# Altium schematic symbol library WR-TBL_Pluggable Connector.SchLib: 879 symbols (part 14 of 15)
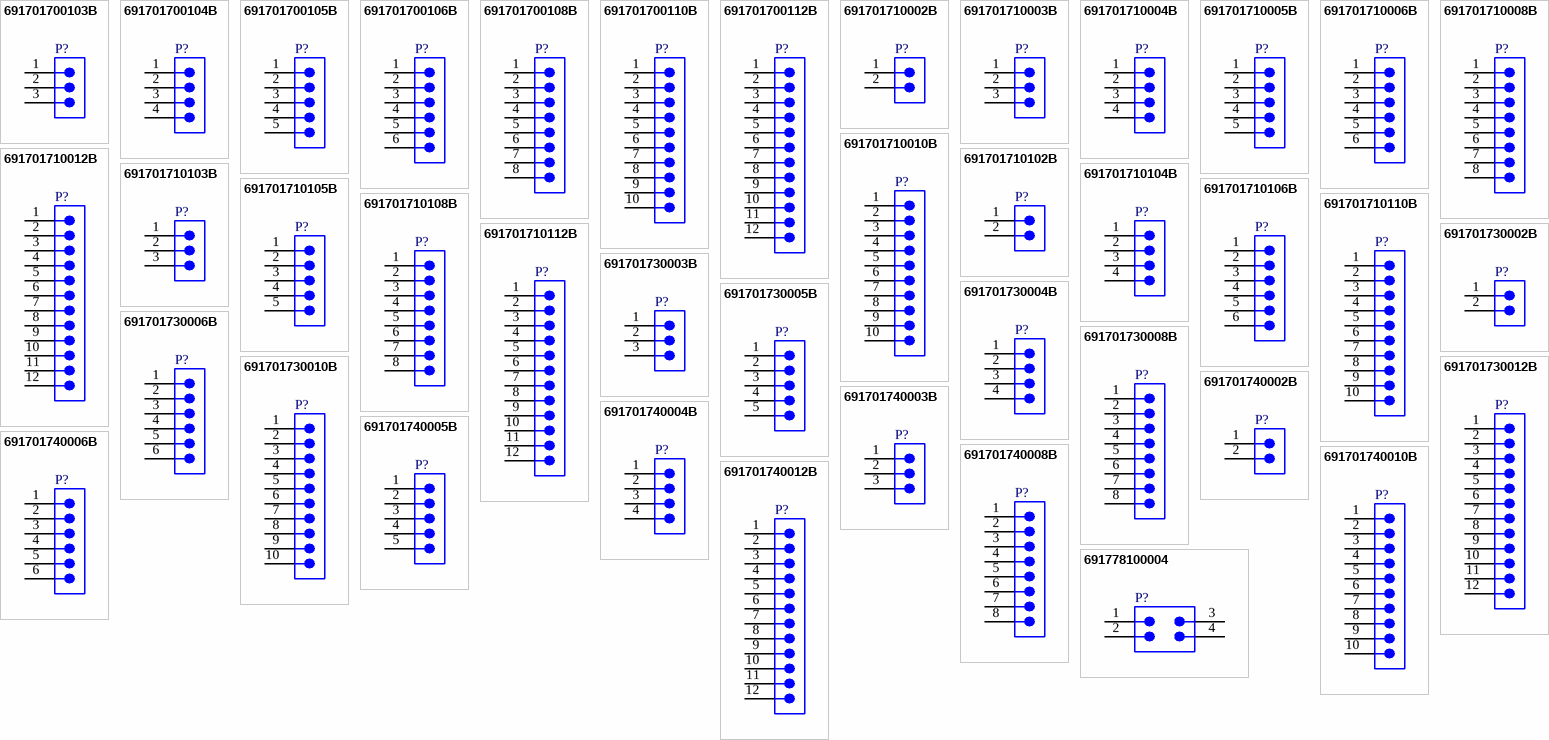
[diagram p34: symbols 691701700103B to 691778100004]

## 691701710005B
designator P?  (value not drawn)
WR-TBL Series 7017B Open Horizontal PCB Header, THR, pitch 5mm, 05p; Manufacturer: Wurth Elektronik; Insulator Material: LCP; Rated Current (cULus): 15A; Working Voltage (cULus): 300V (AC); Withstanding Voltage (cULus): 1600V (AC); Manufacturer Part Number: 691701710005B; Product Series: WR-TBL; ComponentLink1Description: Website Link; ComponentLink1URL: https://www.we-online.com; ComponentLink2Description: Datasheet Link; ComponentLink2URL: https://www.we-online.com/components/products/datasheet/691701710005B; Mount: Through Hole Reflow; Operating Temperature Min: -40degC; Operating Temperature Max: 130degC; Packaging: Tape and Reel; Application: Pluggable; Number of Pins: 5; Number of Rows: 1; Orientation: Horizontal; Lead Pitch: 5mm
footprint 691701710005B
pins: 1, 2, 3, 4, 5

## 691701710006B
designator P?  (value not drawn)
WR-TBL Series 7017B Open Horizontal PCB Header, THR, pitch 5mm, 06p; Manufacturer: Wurth Elektronik; Insulator Material: LCP; Rated Current (cULus): 15A; Working Voltage (cULus): 300V (AC); Withstanding Voltage (cULus): 1600V (AC); Manufacturer Part Number: 691701710006B; Product Series: WR-TBL; ComponentLink1Description: Website Link; ComponentLink1URL: https://www.we-online.com; ComponentLink2Description: Datasheet Link; ComponentLink2URL: https://www.we-online.com/components/products/datasheet/691701710006B; Mount: Through Hole Reflow; Operating Temperature Min: -40degC; Operating Temperature Max: 130degC; Packaging: Tape and Reel; Application: Pluggable; Number of Pins: 6; Number of Rows: 1; Orientation: Horizontal; Lead Pitch: 5mm
footprint 691701710006B
pins: 1, 2, 3, 4, 5, 6

## 691701710008B
designator P?  (value not drawn)
WR-TBL Series 7017B Open Horizontal PCB Header, THR, pitch 5mm, 08p; Manufacturer: Wurth Elektronik; Insulator Material: LCP; Rated Current (cULus): 15A; Working Voltage (cULus): 300V (AC); Withstanding Voltage (cULus): 1600V (AC); Manufacturer Part Number: 691701710008B; Product Series: WR-TBL; ComponentLink1Description: Website Link; ComponentLink1URL: https://www.we-online.com; ComponentLink2Description: Datasheet Link; ComponentLink2URL: https://www.we-online.com/components/products/datasheet/691701710008B; Mount: Through Hole Reflow; Operating Temperature Min: -40degC; Operating Temperature Max: 130degC; Packaging: Tape and Reel; Application: Pluggable; Number of Pins: 8; Number of Rows: 1; Orientation: Horizontal; Lead Pitch: 5mm
footprint 691701710008B
pins: 1, 2, 3, 4, 5, 6, 7, 8

## 691701710010B
designator P?  (value not drawn)
WR-TBL Series 7017B Open Horizontal PCB Header, THR, pitch 5mm, 10p; Manufacturer: Wurth Elektronik; Insulator Material: LCP; Rated Current (cULus): 15A; Working Voltage (cULus): 300V (AC); Withstanding Voltage (cULus): 1600V (AC); Manufacturer Part Number: 691701710010B; Product Series: WR-TBL; ComponentLink1Description: Website Link; ComponentLink1URL: https://www.we-online.com; ComponentLink2Description: Datasheet Link; ComponentLink2URL: https://www.we-online.com/components/products/datasheet/691701710010B; Mount: Through Hole Reflow; Operating Temperature Min: -40degC; Operating Temperature Max: 130degC; Packaging: Tape and Reel; Application: Pluggable; Number of Pins: 10; Number of Rows: 1; Orientation: Horizontal; Lead Pitch: 5mm
footprint 691701710010B
pins: 1, 2, 3, 4, 5, 6, 7, 8, 9, 10

## 691701710012B
designator P?  (value not drawn)
WR-TBL Series 7017B Open Horizontal PCB Header, THR, pitch 5mm, 12p; Manufacturer: Wurth Elektronik; Insulator Material: LCP; Rated Current (cULus): 15A; Working Voltage (cULus): 300V (AC); Withstanding Voltage (cULus): 1600V (AC); Manufacturer Part Number: 691701710012B; Product Series: WR-TBL; ComponentLink1Description: Website Link; ComponentLink1URL: https://www.we-online.com; ComponentLink2Description: Datasheet Link; ComponentLink2URL: https://www.we-online.com/components/products/datasheet/691701710012B; Mount: Through Hole Reflow; Operating Temperature Min: -40degC; Operating Temperature Max: 130degC; Packaging: Tape and Reel; Application: Pluggable; Number of Pins: 12; Number of Rows: 1; Orientation: Horizontal; Lead Pitch: 5mm
footprint 691701710012B
pins: 1, 2, 3, 4, 5, 6, 7, 8, 9, 10, 11, 12

## 691701710102B
designator P?  (value not drawn)
WR-TBL Series 7017B Closed Horizontal PCB Header, THR, pitch 5mm, 02p; Manufacturer: Wurth Elektronik; Insulator Material: LCP; Rated Current (cULus): 15A; Working Voltage (cULus): 300V (AC); Withstanding Voltage (cULus): 1600V (AC); Manufacturer Part Number: 691701710102B; Product Series: WR-TBL; ComponentLink1Description: Website Link; ComponentLink1URL: https://www.we-online.com; ComponentLink2Description: Datasheet Link; ComponentLink2URL: https://www.we-online.com/components/products/datasheet/691701710102B; Mount: Through Hole Reflow; Operating Temperature Min: -40degC; Operating Temperature Max: 130degC; Packaging: Tape and Reel; Application: Pluggable; Number of Pins: 2; Number of Rows: 1; Orientation: Horizontal; Lead Pitch: 5mm
footprint 691701710102B
pins: 1, 2

## 691701710103B
designator P?  (value not drawn)
WR-TBL Series 7017B Closed Horizontal PCB Header, THR, pitch 5mm, 03p; Manufacturer: Wurth Elektronik; Insulator Material: LCP; Rated Current (cULus): 15A; Working Voltage (cULus): 300V (AC); Withstanding Voltage (cULus): 1600V (AC); Manufacturer Part Number: 691701710103B; Product Series: WR-TBL; ComponentLink1Description: Website Link; ComponentLink1URL: https://www.we-online.com; ComponentLink2Description: Datasheet Link; ComponentLink2URL: https://www.we-online.com/components/products/datasheet/691701710103B; Mount: Through Hole Reflow; Operating Temperature Min: -40degC; Operating Temperature Max: 130degC; Packaging: Tape and Reel; Application: Pluggable; Number of Pins: 3; Number of Rows: 1; Orientation: Horizontal; Lead Pitch: 5mm
footprint 691701710103B
pins: 1, 2, 3

## 691701710104B
designator P?  (value not drawn)
WR-TBL Series 7017B Closed Horizontal PCB Header, THR, pitch 5mm, 04p; Manufacturer: Wurth Elektronik; Insulator Material: LCP; Rated Current (cULus): 15A; Working Voltage (cULus): 300V (AC); Withstanding Voltage (cULus): 1600V (AC); Manufacturer Part Number: 691701710104B; Product Series: WR-TBL; ComponentLink1Description: Website Link; ComponentLink1URL: https://www.we-online.com; ComponentLink2Description: Datasheet Link; ComponentLink2URL: https://www.we-online.com/components/products/datasheet/691701710104B; Mount: Through Hole Reflow; Operating Temperature Min: -40degC; Operating Temperature Max: 130degC; Packaging: Tape and Reel; Application: Pluggable; Number of Pins: 4; Number of Rows: 1; Orientation: Horizontal; Lead Pitch: 5mm
footprint 691701710104B
pins: 1, 2, 3, 4

## 691701710105B
designator P?  (value not drawn)
WR-TBL Series 7017B Closed Horizontal PCB Header, THR, pitch 5mm, 05p; Manufacturer: Wurth Elektronik; Insulator Material: LCP; Rated Current (cULus): 15A; Working Voltage (cULus): 300V (AC); Withstanding Voltage (cULus): 1600V (AC); Manufacturer Part Number: 691701710105B; Product Series: WR-TBL; ComponentLink1Description: Website Link; ComponentLink1URL: https://www.we-online.com; ComponentLink2Description: Datasheet Link; ComponentLink2URL: https://www.we-online.com/components/products/datasheet/691701710105B; Mount: Through Hole Reflow; Operating Temperature Min: -40degC; Operating Temperature Max: 130degC; Packaging: Tape and Reel; Application: Pluggable; Number of Pins: 5; Number of Rows: 1; Orientation: Horizontal; Lead Pitch: 5mm
footprint 691701710105B
pins: 1, 2, 3, 4, 5

## 691701710106B
designator P?  (value not drawn)
WR-TBL Series 7017B Closed Horizontal PCB Header, THR, pitch 5mm, 06p; Manufacturer: Wurth Elektronik; Insulator Material: LCP; Rated Current (cULus): 15A; Working Voltage (cULus): 300V (AC); Withstanding Voltage (cULus): 1600V (AC); Manufacturer Part Number: 691701710106B; Product Series: WR-TBL; ComponentLink1Description: Website Link; ComponentLink1URL: https://www.we-online.com; ComponentLink2Description: Datasheet Link; ComponentLink2URL: https://www.we-online.com/components/products/datasheet/691701710106B; Mount: Through Hole Reflow; Operating Temperature Min: -40degC; Operating Temperature Max: 130degC; Packaging: Tape and Reel; Application: Pluggable; Number of Pins: 6; Number of Rows: 1; Orientation: Horizontal; Lead Pitch: 5mm
footprint 691701710106B
pins: 1, 2, 3, 4, 5, 6

## 691701710108B
designator P?  (value not drawn)
WR-TBL Series 7017B Closed Horizontal PCB Header, THR, pitch 5mm, 08p; Manufacturer: Wurth Elektronik; Insulator Material: LCP; Rated Current (cULus): 15A; Working Voltage (cULus): 300V (AC); Withstanding Voltage (cULus): 1600V (AC); Manufacturer Part Number: 691701710108B; Product Series: WR-TBL; ComponentLink1Description: Website Link; ComponentLink1URL: https://www.we-online.com; ComponentLink2Description: Datasheet Link; ComponentLink2URL: https://www.we-online.com/components/products/datasheet/691701710108B; Mount: Through Hole Reflow; Operating Temperature Min: -40degC; Operating Temperature Max: 130degC; Packaging: Tape and Reel; Application: Pluggable; Number of Pins: 8; Number of Rows: 1; Orientation: Horizontal; Lead Pitch: 5mm
footprint 691701710108B
pins: 1, 2, 3, 4, 5, 6, 7, 8

## 691701710110B
designator P?  (value not drawn)
WR-TBL Series 7017B Closed Horizontal PCB Header, THR, pitch 5mm, 10p; Manufacturer: Wurth Elektronik; Insulator Material: LCP; Rated Current (cULus): 15A; Working Voltage (cULus): 300V (AC); Withstanding Voltage (cULus): 1600V (AC); Manufacturer Part Number: 691701710110B; Product Series: WR-TBL; ComponentLink1Description: Website Link; ComponentLink1URL: https://www.we-online.com; ComponentLink2Description: Datasheet Link; ComponentLink2URL: https://www.we-online.com/components/products/datasheet/691701710110B; Mount: Through Hole Reflow; Operating Temperature Min: -40degC; Operating Temperature Max: 130degC; Packaging: Tape and Reel; Application: Pluggable; Number of Pins: 10; Number of Rows: 1; Orientation: Horizontal; Lead Pitch: 5mm
footprint 691701710110B
pins: 1, 2, 3, 4, 5, 6, 7, 8, 9, 10

## 691701710112B
designator P?  (value not drawn)
WR-TBL Series 7017B Closed Horizontal PCB Header, THR, pitch 5mm, 12p; Manufacturer: Wurth Elektronik; Insulator Material: LCP; Rated Current (cULus): 15A; Working Voltage (cULus): 300V (AC); Withstanding Voltage (cULus): 1600V (AC); Manufacturer Part Number: 691701710112B; Product Series: WR-TBL; ComponentLink1Description: Website Link; ComponentLink1URL: https://www.we-online.com; ComponentLink2Description: Datasheet Link; ComponentLink2URL: https://www.we-online.com/components/products/datasheet/691701710112B; Mount: Through Hole Reflow; Operating Temperature Min: -40degC; Operating Temperature Max: 130degC; Packaging: Tape and Reel; Application: Pluggable; Number of Pins: 12; Number of Rows: 1; Orientation: Horizontal; Lead Pitch: 5mm
footprint 691701710112B
pins: 1, 2, 3, 4, 5, 6, 7, 8, 9, 10, 11, 12

## 691701730002B
designator P?  (value not drawn)
WR-TBL Series 7017B Closed Vertical PCB Header with Flanges, THR, pitch 5mm, 02p; Manufacturer: Wurth Elektronik; Insulator Material: LCP; Rated Current (cULus): 15A; Working Voltage (cULus): 300V (AC); Withstanding Voltage (cULus): 1600V (AC); Manufacturer Part Number: 691701730002B; Product Series: WR-TBL; ComponentLink1Description: Website Link; ComponentLink1URL: https://www.we-online.com; ComponentLink2Description: Datasheet Link; ComponentLink2URL: https://www.we-online.com/components/products/datasheet/691701730002B; Mount: Through Hole Reflow; Operating Temperature Min: -40degC; Operating Temperature Max: 130degC; Packaging: Tape and Reel; Application: Pluggable; Number of Pins: 2; Number of Rows: 1; Orientation: Vertical; Lead Pitch: 5mm
footprint 691701730002B
pins: 1, 2

## 691701730003B
designator P?  (value not drawn)
WR-TBL Series 7017B Closed Vertical PCB Header with Flanges, THR, pitch 5mm, 03p; Manufacturer: Wurth Elektronik; Insulator Material: LCP; Rated Current (cULus): 15A; Working Voltage (cULus): 300V (AC); Withstanding Voltage (cULus): 1600V (AC); Manufacturer Part Number: 691701730003B; Product Series: WR-TBL; ComponentLink1Description: Website Link; ComponentLink1URL: https://www.we-online.com; ComponentLink2Description: Datasheet Link; ComponentLink2URL: https://www.we-online.com/components/products/datasheet/691701730003B; Mount: Through Hole Reflow; Operating Temperature Min: -40degC; Operating Temperature Max: 130degC; Packaging: Tape and Reel; Application: Pluggable; Number of Pins: 3; Number of Rows: 1; Orientation: Vertical; Lead Pitch: 5mm
footprint 691701730003B
pins: 1, 2, 3

## 691701730004B
designator P?  (value not drawn)
WR-TBL Series 7017B Closed Vertical PCB Header with Flanges, THR, pitch 5mm, 04p; Manufacturer: Wurth Elektronik; Insulator Material: LCP; Rated Current (cULus): 15A; Working Voltage (cULus): 300V (AC); Withstanding Voltage (cULus): 1600V (AC); Manufacturer Part Number: 691701730004B; Product Series: WR-TBL; ComponentLink1Description: Website Link; ComponentLink1URL: https://www.we-online.com; ComponentLink2Description: Datasheet Link; ComponentLink2URL: https://www.we-online.com/components/products/datasheet/691701730004B; Mount: Through Hole Reflow; Operating Temperature Min: -40degC; Operating Temperature Max: 130degC; Packaging: Tape and Reel; Application: Pluggable; Number of Pins: 4; Number of Rows: 1; Orientation: Vertical; Lead Pitch: 5mm
footprint 691701730004B
pins: 1, 2, 3, 4

## 691701730005B
designator P?  (value not drawn)
WR-TBL Series 7017B Closed Vertical PCB Header with Flanges, THR, pitch 5mm, 05p; Manufacturer: Wurth Elektronik; Insulator Material: LCP; Rated Current (cULus): 15A; Working Voltage (cULus): 300V (AC); Withstanding Voltage (cULus): 1600V (AC); Manufacturer Part Number: 691701730005B; Product Series: WR-TBL; ComponentLink1Description: Website Link; ComponentLink1URL: https://www.we-online.com; ComponentLink2Description: Datasheet Link; ComponentLink2URL: https://www.we-online.com/components/products/datasheet/691701730005B; Mount: Through Hole Reflow; Operating Temperature Min: -40degC; Operating Temperature Max: 130degC; Packaging: Tape and Reel; Application: Pluggable; Number of Pins: 5; Number of Rows: 1; Orientation: Vertical; Lead Pitch: 5mm
footprint 691701730005B
pins: 1, 2, 3, 4, 5

## 691701730006B
designator P?  (value not drawn)
WR-TBL Series 7017B Closed Vertical PCB Header with Flanges, THR, pitch 5mm, 06p; Manufacturer: Wurth Elektronik; Insulator Material: LCP; Rated Current (cULus): 15A; Working Voltage (cULus): 300V (AC); Withstanding Voltage (cULus): 1600V (AC); Manufacturer Part Number: 691701730006B; Product Series: WR-TBL; ComponentLink1Description: Website Link; ComponentLink1URL: https://www.we-online.com; ComponentLink2Description: Datasheet Link; ComponentLink2URL: https://www.we-online.com/components/products/datasheet/691701730006B; Mount: Through Hole Reflow; Operating Temperature Min: -40degC; Operating Temperature Max: 130degC; Packaging: Tape and Reel; Application: Pluggable; Number of Pins: 6; Number of Rows: 1; Orientation: Vertical; Lead Pitch: 5mm
footprint 691701730006B
pins: 1, 2, 3, 4, 5, 6

## 691701730008B
designator P?  (value not drawn)
WR-TBL Series 7017B Closed Vertical PCB Header with Flanges, THR, pitch 5mm, 08p; Manufacturer: Wurth Elektronik; Insulator Material: LCP; Rated Current (cULus): 15A; Working Voltage (cULus): 300V (AC); Withstanding Voltage (cULus): 1600V (AC); Manufacturer Part Number: 691701730008B; Product Series: WR-TBL; ComponentLink1Description: Website Link; ComponentLink1URL: https://www.we-online.com; ComponentLink2Description: Datasheet Link; ComponentLink2URL: https://www.we-online.com/components/products/datasheet/691701730008B; Mount: Through Hole Reflow; Operating Temperature Min: -40degC; Operating Temperature Max: 130degC; Packaging: Tape and Reel; Application: Pluggable; Number of Pins: 8; Number of Rows: 1; Orientation: Vertical; Lead Pitch: 5mm
footprint 691701730008B
pins: 1, 2, 3, 4, 5, 6, 7, 8

## 691701730010B
designator P?  (value not drawn)
WR-TBL Series 7017B Closed Vertical PCB Header with Flanges, THR, pitch 5mm, 10p; Manufacturer: Wurth Elektronik; Insulator Material: LCP; Rated Current (cULus): 15A; Working Voltage (cULus): 300V (AC); Withstanding Voltage (cULus): 1600V (AC); Manufacturer Part Number: 691701730010B; Product Series: WR-TBL; ComponentLink1Description: Website Link; ComponentLink1URL: https://www.we-online.com; ComponentLink2Description: Datasheet Link; ComponentLink2URL: https://www.we-online.com/components/products/datasheet/691701730010B; Mount: Through Hole Reflow; Operating Temperature Min: -40degC; Operating Temperature Max: 130degC; Packaging: Tape and Reel; Application: Pluggable; Number of Pins: 10; Number of Rows: 1; Orientation: Vertical; Lead Pitch: 5mm
footprint 691701730010B
pins: 1, 2, 3, 4, 5, 6, 7, 8, 9, 10

## 691701730012B
designator P?  (value not drawn)
WR-TBL Series 7017B Closed Vertical PCB Header with Flanges, THR, pitch 5mm, 12p; Manufacturer: Wurth Elektronik; Insulator Material: LCP; Rated Current (cULus): 15A; Working Voltage (cULus): 300V (AC); Withstanding Voltage (cULus): 1600V (AC); Manufacturer Part Number: 691701730012B; Product Series: WR-TBL; ComponentLink1Description: Website Link; ComponentLink1URL: https://www.we-online.com; ComponentLink2Description: Datasheet Link; ComponentLink2URL: https://www.we-online.com/components/products/datasheet/691701730012B; Mount: Through Hole Reflow; Operating Temperature Min: -40degC; Operating Temperature Max: 130degC; Packaging: Tape and Reel; Application: Pluggable; Number of Pins: 12; Number of Rows: 1; Orientation: Vertical; Lead Pitch: 5mm
footprint 691701730012B
pins: 1, 2, 3, 4, 5, 6, 7, 8, 9, 10, 11, 12

## 691701740002B
designator P?  (value not drawn)
WR-TBL Series 7017B Closed Horizontal PCB Header with Flanges, THR, pitch 5mm, 02p; Manufacturer: Wurth Elektronik; Insulator Material: LCP; Rated Current (cULus): 15A; Working Voltage (cULus): 300V (AC); Withstanding Voltage (cULus): 1600V (AC); Manufacturer Part Number: 691701740002B; Product Series: WR-TBL; ComponentLink1Description: Website Link; ComponentLink1URL: https://www.we-online.com; ComponentLink2Description: Datasheet Link; ComponentLink2URL: https://www.we-online.com/components/products/datasheet/691701740002B; Mount: Through Hole Reflow; Operating Temperature Min: -40degC; Operating Temperature Max: 130degC; Packaging: Tape and Reel; Application: Pluggable; Number of Pins: 2; Number of Rows: 1; Orientation: Horizontal; Lead Pitch: 5mm
footprint 691701740002B
pins: 1, 2

## 691701740003B
designator P?  (value not drawn)
WR-TBL Series 7017B Closed Horizontal PCB Header with Flanges, THR, pitch 5mm, 03p; Manufacturer: Wurth Elektronik; Insulator Material: LCP; Rated Current (cULus): 15A; Working Voltage (cULus): 300V (AC); Withstanding Voltage (cULus): 1600V (AC); Manufacturer Part Number: 691701740003B; Product Series: WR-TBL; ComponentLink1Description: Website Link; ComponentLink1URL: https://www.we-online.com; ComponentLink2Description: Datasheet Link; ComponentLink2URL: https://www.we-online.com/components/products/datasheet/691701740003B; Mount: Through Hole Reflow; Operating Temperature Min: -40degC; Operating Temperature Max: 130degC; Packaging: Tape and Reel; Application: Pluggable; Number of Pins: 3; Number of Rows: 1; Orientation: Horizontal; Lead Pitch: 5mm
footprint 691701740003B
pins: 1, 2, 3

## 691701740004B
designator P?  (value not drawn)
WR-TBL Series 7017B Closed Horizontal PCB Header with Flanges, THR, pitch 5mm, 04p; Manufacturer: Wurth Elektronik; Insulator Material: LCP; Rated Current (cULus): 15A; Working Voltage (cULus): 300V (AC); Withstanding Voltage (cULus): 1600V (AC); Manufacturer Part Number: 691701740004B; Product Series: WR-TBL; ComponentLink1Description: Website Link; ComponentLink1URL: https://www.we-online.com; ComponentLink2Description: Datasheet Link; ComponentLink2URL: https://www.we-online.com/components/products/datasheet/691701740004B; Mount: Through Hole Reflow; Operating Temperature Min: -40degC; Operating Temperature Max: 130degC; Packaging: Tape and Reel; Application: Pluggable; Number of Pins: 4; Number of Rows: 1; Orientation: Horizontal; Lead Pitch: 5mm
footprint 691701740004B
pins: 1, 2, 3, 4

## 691701740005B
designator P?  (value not drawn)
WR-TBL Series 7017B Closed Horizontal PCB Header with Flanges, THR, pitch 5mm, 05p; Manufacturer: Wurth Elektronik; Insulator Material: LCP; Rated Current (cULus): 15A; Working Voltage (cULus): 300V (AC); Withstanding Voltage (cULus): 1600V (AC); Manufacturer Part Number: 691701740005B; Product Series: WR-TBL; ComponentLink1Description: Website Link; ComponentLink1URL: https://www.we-online.com; ComponentLink2Description: Datasheet Link; ComponentLink2URL: https://www.we-online.com/components/products/datasheet/691701740005B; Mount: Through Hole Reflow; Operating Temperature Min: -40degC; Operating Temperature Max: 130degC; Packaging: Tape and Reel; Application: Pluggable; Number of Pins: 5; Number of Rows: 1; Orientation: Horizontal; Lead Pitch: 5mm
footprint 691701740005B
pins: 1, 2, 3, 4, 5

## 691701740006B
designator P?  (value not drawn)
WR-TBL Series 7017B Closed Horizontal PCB Header with Flanges, THR, pitch 5mm, 06p; Manufacturer: Wurth Elektronik; Insulator Material: LCP; Rated Current (cULus): 15A; Working Voltage (cULus): 300V (AC); Withstanding Voltage (cULus): 1600V (AC); Manufacturer Part Number: 691701740006B; Product Series: WR-TBL; ComponentLink1Description: Website Link; ComponentLink1URL: https://www.we-online.com; ComponentLink2Description: Datasheet Link; ComponentLink2URL: https://www.we-online.com/components/products/datasheet/691701740006B; Mount: Through Hole Reflow; Operating Temperature Min: -40degC; Operating Temperature Max: 130degC; Packaging: Tape and Reel; Application: Pluggable; Number of Pins: 6; Number of Rows: 1; Orientation: Horizontal; Lead Pitch: 5mm
footprint 691701740006B
pins: 1, 2, 3, 4, 5, 6

## 691701740008B
designator P?  (value not drawn)
WR-TBL Series 7017B Closed Horizontal PCB Header with Flanges, THR, pitch 5mm, 08p; Manufacturer: Wurth Elektronik; Insulator Material: LCP; Rated Current (cULus): 15A; Working Voltage (cULus): 300V (AC); Withstanding Voltage (cULus): 1600V (AC); Manufacturer Part Number: 691701740008B; Product Series: WR-TBL; ComponentLink1Description: Website Link; ComponentLink1URL: https://www.we-online.com; ComponentLink2Description: Datasheet Link; ComponentLink2URL: https://www.we-online.com/components/products/datasheet/691701740008B; Mount: Through Hole Reflow; Operating Temperature Min: -40degC; Operating Temperature Max: 130degC; Packaging: Tape and Reel; Application: Pluggable; Number of Pins: 8; Number of Rows: 1; Orientation: Horizontal; Lead Pitch: 5mm
footprint 691701740008B
pins: 1, 2, 3, 4, 5, 6, 7, 8

## 691701740010B
designator P?  (value not drawn)
WR-TBL Series 7017B Closed Horizontal PCB Header with Flanges, THR, pitch 5mm, 10p; Manufacturer: Wurth Elektronik; Insulator Material: LCP; Rated Current (cULus): 15A; Working Voltage (cULus): 300V (AC); Withstanding Voltage (cULus): 2000V (AC); Manufacturer Part Number: 691701740010B; Product Series: WR-TBL; ComponentLink1Description: Website Link; ComponentLink1URL: https://www.we-online.com; ComponentLink2Description: Datasheet Link; ComponentLink2URL: https://www.we-online.com/components/products/datasheet/691701740010B; Mount: Through Hole Reflow; Operating Temperature Min: -40degC; Operating Temperature Max: 130degC; Packaging: Tape and Reel; Application: Pluggable; Number of Pins: 10; Number of Rows: 1; Orientation: Horizontal; Lead Pitch: 5mm
footprint 691701740010B
pins: 1, 2, 3, 4, 5, 6, 7, 8, 9, 10

## 691701740012B
designator P?  (value not drawn)
WR-TBL Series 7017B Closed Horizontal PCB Header with Flanges, THR, pitch 5mm, 12p; Manufacturer: Wurth Elektronik; Insulator Material: LCP; Rated Current (cULus): 15A; Working Voltage (cULus): 300V (AC); Withstanding Voltage (cULus): 2000V (AC); Manufacturer Part Number: 691701740012B; Product Series: WR-TBL; ComponentLink1Description: Website Link; ComponentLink1URL: https://www.we-online.com; ComponentLink2Description: Datasheet Link; ComponentLink2URL: https://www.we-online.com/components/products/datasheet/691701740012B; Mount: Through Hole Reflow; Operating Temperature Min: -40degC; Operating Temperature Max: 130degC; Packaging: Tape and Reel; Application: Pluggable; Number of Pins: 12; Number of Rows: 1; Orientation: Horizontal; Lead Pitch: 5mm
footprint 691701740012B
pins: 1, 2, 3, 4, 5, 6, 7, 8, 9, 10, 11, 12

## 691778100004
designator P?  (value not drawn)
WR-TBL Series 7781 PCB Header Dual Row Vertical, THR, pitch 3.5mm, 04p; Manufacturer: Wurth Elektronik; Insulator Material: LCP; Rated Current: 8A; Working Voltage: 300V (AC); Withstanding Voltage: 1600V (AC); Manufacturer Part Number: 691778100004; Product Series: WR-TBL; ComponentLink1Description: Website Link; ComponentLink1URL: https://www.we-online.com; ComponentLink2Description: Datasheet Link; ComponentLink2URL: https://www.we-online.com/components/products/datasheet/691778100004; Mount: Through Hole Reflow; Operating Temperature Min: -40degC; Operating Temperature Max: 130degC; Packaging: Tape and Reel; Application: Pluggable; Number of Pins: 4; Number of Rows: 2; Orientation: Vertical; Lead Pitch: 3.5mm
footprint 691778100004
pins: 1, 2, 3, 4

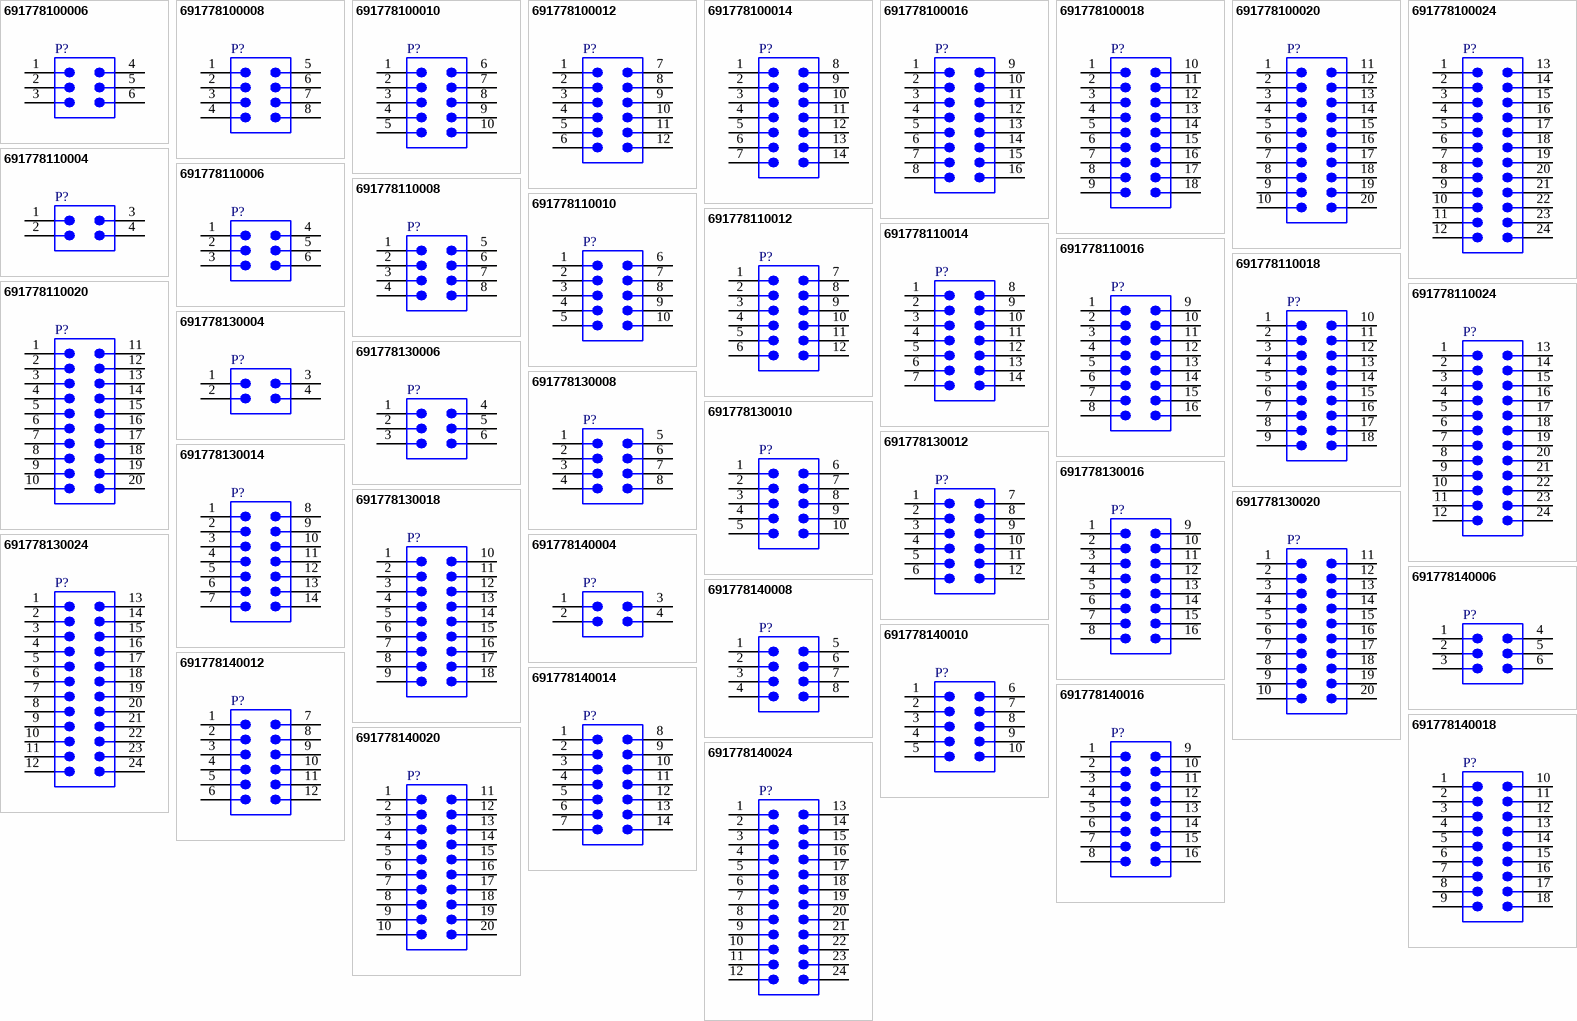
[diagram p21: symbols 691778100006 to 691778140024]

## 691778100006
designator P?  (value not drawn)
WR-TBL Series 7781 PCB Header Dual Row Vertical, THR, pitch 3.5mm, 06p; Manufacturer: Wurth Elektronik; Insulator Material: LCP; Rated Current: 8A; Working Voltage: 300V (AC); Withstanding Voltage: 1600V (AC); Manufacturer Part Number: 691778100006; Product Series: WR-TBL; ComponentLink1Description: Website Link; ComponentLink1URL: https://www.we-online.com; ComponentLink2Description: Datasheet Link; ComponentLink2URL: https://www.we-online.com/components/products/datasheet/691778100006; Mount: Through Hole Reflow; Operating Temperature Min: -40degC; Operating Temperature Max: 130degC; Packaging: Tape and Reel; Application: Pluggable; Number of Pins: 6; Number of Rows: 2; Orientation: Vertical; Lead Pitch: 3.5mm
footprint 691778100006
pins: 1, 2, 3, 4, 5, 6

## 691778100008
designator P?  (value not drawn)
WR-TBL Series 7781 PCB Header Dual Row Vertical, THR, pitch 3.5mm, 08p; Manufacturer: Wurth Elektronik; Insulator Material: LCP; Rated Current: 8A; Working Voltage: 300V (AC); Withstanding Voltage: 1600V (AC); Manufacturer Part Number: 691778100008; Product Series: WR-TBL; ComponentLink1Description: Website Link; ComponentLink1URL: https://www.we-online.com; ComponentLink2Description: Datasheet Link; ComponentLink2URL: https://www.we-online.com/components/products/datasheet/691778100008; Mount: Through Hole Reflow; Operating Temperature Min: -40degC; Operating Temperature Max: 130degC; Packaging: Tape and Reel; Application: Pluggable; Number of Pins: 8; Number of Rows: 2; Orientation: Vertical; Lead Pitch: 3.5mm
footprint 691778100008
pins: 1, 2, 3, 4, 5, 6, 7, 8

## 691778100010
designator P?  (value not drawn)
WR-TBL Series 7781 PCB Header Dual Row Vertical, THR, pitch 3.5mm, 10p; Manufacturer: Wurth Elektronik; Insulator Material: LCP; Rated Current: 8A; Working Voltage: 300V (AC); Withstanding Voltage: 1600V (AC); Manufacturer Part Number: 691778100010; Product Series: WR-TBL; ComponentLink1Description: Website Link; ComponentLink1URL: https://www.we-online.com; ComponentLink2Description: Datasheet Link; ComponentLink2URL: https://www.we-online.com/components/products/datasheet/691778100010; Mount: Through Hole Reflow; Operating Temperature Min: -40degC; Operating Temperature Max: 130degC; Packaging: Tape and Reel; Application: Pluggable; Number of Pins: 10; Number of Rows: 2; Orientation: Vertical; Lead Pitch: 3.5mm
footprint 691778100010
pins: 1, 2, 3, 4, 5, 6, 7, 8, 9, 10

## 691778100012
designator P?  (value not drawn)
WR-TBL Series 7781 PCB Header Dual Row Vertical, THR, pitch 3.5mm, 12p; Manufacturer: Wurth Elektronik; Insulator Material: LCP; Rated Current: 8A; Working Voltage: 300V (AC); Withstanding Voltage: 1600V (AC); Manufacturer Part Number: 691778100012; Product Series: WR-TBL; ComponentLink1Description: Website Link; ComponentLink1URL: https://www.we-online.com; ComponentLink2Description: Datasheet Link; ComponentLink2URL: https://www.we-online.com/components/products/datasheet/691778100012; Mount: Through Hole Reflow; Operating Temperature Min: -40degC; Operating Temperature Max: 130degC; Packaging: Tape and Reel; Application: Pluggable; Number of Pins: 12; Number of Rows: 2; Orientation: Vertical; Lead Pitch: 3.5mm
footprint 691778100012
pins: 1, 2, 3, 4, 5, 6, 7, 8, 9, 10, 11, 12

## 691778100014
designator P?  (value not drawn)
WR-TBL Series 7781 PCB Header Dual Row Vertical, THR, pitch 3.5mm, 14p; Manufacturer: Wurth Elektronik; Insulator Material: LCP; Rated Current: 8A; Working Voltage: 300V (AC); Withstanding Voltage: 1600V (AC); Manufacturer Part Number: 691778100014; Product Series: WR-TBL; ComponentLink1Description: Website Link; ComponentLink1URL: https://www.we-online.com; ComponentLink2Description: Datasheet Link; ComponentLink2URL: https://www.we-online.com/components/products/datasheet/691778100014; Mount: Through Hole Reflow; Operating Temperature Min: -40degC; Operating Temperature Max: 130degC; Packaging: Tape and Reel; Application: Pluggable; Number of Pins: 14; Number of Rows: 2; Orientation: Vertical; Lead Pitch: 3.5mm
footprint 691778100014
pins: 1, 2, 3, 4, 5, 6, 7, 8, 9, 10, 11, 12, 13, 14

## 691778100016
designator P?  (value not drawn)
WR-TBL Series 7781 PCB Header Dual Row Vertical, THR, pitch 3.5mm, 16p; Manufacturer: Wurth Elektronik; Insulator Material: LCP; Rated Current: 8A; Working Voltage: 300V (AC); Withstanding Voltage: 1600V (AC); Manufacturer Part Number: 691778100016; Product Series: WR-TBL; ComponentLink1Description: Website Link; ComponentLink1URL: https://www.we-online.com; ComponentLink2Description: Datasheet Link; ComponentLink2URL: https://www.we-online.com/components/products/datasheet/691778100016; Mount: Through Hole Reflow; Operating Temperature Min: -40degC; Operating Temperature Max: 130degC; Packaging: Tape and Reel; Application: Pluggable; Number of Pins: 16; Number of Rows: 2; Orientation: Vertical; Lead Pitch: 3.5mm
footprint 691778100016
pins: 1, 2, 3, 4, 5, 6, 7, 8, 9, 10, 11, 12, 13, 14, 15, 16

## 691778100018
designator P?  (value not drawn)
WR-TBL Series 7781 PCB Header Dual Row Vertical, THR, pitch 3.5mm, 18p; Manufacturer: Wurth Elektronik; Insulator Material: LCP; Rated Current: 8A; Working Voltage: 300V (AC); Withstanding Voltage: 1600V (AC); Manufacturer Part Number: 691778100018; Product Series: WR-TBL; ComponentLink1Description: Website Link; ComponentLink1URL: https://www.we-online.com; ComponentLink2Description: Datasheet Link; ComponentLink2URL: https://www.we-online.com/components/products/datasheet/691778100018; Mount: Through Hole Reflow; Operating Temperature Min: -40degC; Operating Temperature Max: 130degC; Packaging: Tape and Reel; Application: Pluggable; Number of Pins: 18; Number of Rows: 2; Orientation: Vertical; Lead Pitch: 3.5mm
footprint 691778100018
pins: 1, 2, 3, 4, 5, 6, 7, 8, 9, 10, 11, 12, 13, 14, 15, 16, 17, 18

## 691778100020
designator P?  (value not drawn)
WR-TBL Series 7781 PCB Header Dual Row Vertical, THR, pitch 3.5mm, 20p; Manufacturer: Wurth Elektronik; Insulator Material: LCP; Rated Current: 8A; Working Voltage: 300V (AC); Withstanding Voltage: 1600V (AC); Manufacturer Part Number: 691778100020; Product Series: WR-TBL; ComponentLink1Description: Website Link; ComponentLink1URL: https://www.we-online.com; ComponentLink2Description: Datasheet Link; ComponentLink2URL: https://www.we-online.com/components/products/datasheet/691778100020; Mount: Through Hole Reflow; Operating Temperature Min: -40degC; Operating Temperature Max: 130degC; Packaging: Tape and Reel; Application: Pluggable; Number of Pins: 20; Number of Rows: 2; Orientation: Vertical; Lead Pitch: 3.5mm
footprint 691778100020
pins: 1, 2, 3, 4, 5, 6, 7, 8, 9, 10, 11, 12, 13, 14, 15, 16, 17, 18, 19, 20

## 691778100024
designator P?  (value not drawn)
WR-TBL Series 7781 PCB Header Dual Row Vertical, THR, pitch 3.5mm, 24p; Manufacturer: Wurth Elektronik; Insulator Material: LCP; Rated Current: 8A; Working Voltage: 300V (AC); Withstanding Voltage: 1600V (AC); Manufacturer Part Number: 691778100024; Product Series: WR-TBL; ComponentLink1Description: Website Link; ComponentLink1URL: https://www.we-online.com; ComponentLink2Description: Datasheet Link; ComponentLink2URL: https://www.we-online.com/components/products/datasheet/691778100024; Mount: Through Hole Reflow; Operating Temperature Min: -40degC; Operating Temperature Max: 130degC; Packaging: Tape and Reel; Application: Pluggable; Number of Pins: 24; Number of Rows: 2; Orientation: Vertical; Lead Pitch: 3.5mm
footprint 691778100024
pins: 1, 2, 3, 4, 5, 6, 7, 8, 9, 10, 11, 12, 13, 14, 15, 16, 17, 18, 19, 20, 21, 22, 23, 24

## 691778110004
designator P?  (value not drawn)
WR-TBL Series 7781 PCB Header Dual Row Horizontal, THR, pitch 3.5mm, 04p; Manufacturer: Wurth Elektronik; Insulator Material: LCP; Rated Current: 8A; Working Voltage: 150V (AC); Withstanding Voltage: 1300V (AC); Manufacturer Part Number: 691778110004; Product Series: WR-TBL; ComponentLink1Description: Website Link; ComponentLink1URL: https://www.we-online.com; ComponentLink2Description: Datasheet Link; ComponentLink2URL: https://www.we-online.com/components/products/datasheet/691778110004; Mount: Through Hole Reflow; Operating Temperature Min: -40degC; Operating Temperature Max: 130degC; Packaging: Tape and Reel; Application: Pluggable; Number of Pins: 4; Number of Rows: 2; Orientation: Horizontal; Lead Pitch: 3.5mm
footprint 691778110004
pins: 1, 2, 3, 4

## 691778110006
designator P?  (value not drawn)
WR-TBL Series 7781 PCB Header Dual Row Horizontal, THR, pitch 3.5mm, 06p; Manufacturer: Wurth Elektronik; Insulator Material: LCP; Rated Current: 8A; Working Voltage: 150V (AC); Withstanding Voltage: 1300V (AC); Manufacturer Part Number: 691778110006; Product Series: WR-TBL; ComponentLink1Description: Website Link; ComponentLink1URL: https://www.we-online.com; ComponentLink2Description: Datasheet Link; ComponentLink2URL: https://www.we-online.com/components/products/datasheet/691778110006; Mount: Through Hole Reflow; Operating Temperature Min: -40degC; Operating Temperature Max: 130degC; Packaging: Tape and Reel; Application: Pluggable; Number of Pins: 6; Number of Rows: 2; Orientation: Horizontal; Lead Pitch: 3.5mm
footprint 691778110006
pins: 1, 2, 3, 4, 5, 6

## 691778110008
designator P?  (value not drawn)
WR-TBL Series 7781 PCB Header Dual Row Horizontal, THR, pitch 3.5mm, 08p; Manufacturer: Wurth Elektronik; Insulator Material: LCP; Rated Current: 8A; Working Voltage: 150V (AC); Withstanding Voltage: 1300V (AC); Manufacturer Part Number: 691778110008; Product Series: WR-TBL; ComponentLink1Description: Website Link; ComponentLink1URL: https://www.we-online.com; ComponentLink2Description: Datasheet Link; ComponentLink2URL: https://www.we-online.com/components/products/datasheet/691778110008; Mount: Through Hole Reflow; Operating Temperature Min: -40degC; Operating Temperature Max: 130degC; Packaging: Tape and Reel; Application: Pluggable; Number of Pins: 8; Number of Rows: 2; Orientation: Horizontal; Lead Pitch: 3.5mm
footprint 691778110008
pins: 1, 2, 3, 4, 5, 6, 7, 8

## 691778110010
designator P?  (value not drawn)
WR-TBL Series 7781 PCB Header Dual Row Horizontal, THR, pitch 3.5mm, 10p; Manufacturer: Wurth Elektronik; Insulator Material: LCP; Rated Current: 8A; Working Voltage: 150V (AC); Withstanding Voltage: 1300V (AC); Manufacturer Part Number: 691778110010; Product Series: WR-TBL; ComponentLink1Description: Website Link; ComponentLink1URL: https://www.we-online.com; ComponentLink2Description: Datasheet Link; ComponentLink2URL: https://www.we-online.com/components/products/datasheet/691778110010; Mount: Through Hole Reflow; Operating Temperature Min: -40degC; Operating Temperature Max: 130degC; Packaging: Tape and Reel; Application: Pluggable; Number of Pins: 10; Number of Rows: 2; Orientation: Horizontal; Lead Pitch: 3.5mm
footprint 691778110010
pins: 1, 2, 3, 4, 5, 6, 7, 8, 9, 10

## 691778110012
designator P?  (value not drawn)
WR-TBL Series 7781 PCB Header Dual Row Horizontal, THR, pitch 3.5mm, 12p; Manufacturer: Wurth Elektronik; Insulator Material: LCP; Rated Current: 8A; Working Voltage: 150V (AC); Withstanding Voltage: 1300V (AC); Manufacturer Part Number: 691778110012; Product Series: WR-TBL; ComponentLink1Description: Website Link; ComponentLink1URL: https://www.we-online.com; ComponentLink2Description: Datasheet Link; ComponentLink2URL: https://www.we-online.com/components/products/datasheet/691778110012; Mount: Through Hole Reflow; Operating Temperature Min: -40degC; Operating Temperature Max: 130degC; Packaging: Tape and Reel; Application: Pluggable; Number of Pins: 12; Number of Rows: 2; Orientation: Horizontal; Lead Pitch: 3.5mm
footprint 691778110012
pins: 1, 2, 3, 4, 5, 6, 7, 8, 9, 10, 11, 12

## 691778110014
designator P?  (value not drawn)
WR-TBL Series 7781 PCB Header Dual Row Horizontal, THR, pitch 3.5mm, 14p; Manufacturer: Wurth Elektronik; Insulator Material: LCP; Rated Current: 8A; Working Voltage: 150V (AC); Withstanding Voltage: 1300V (AC); Manufacturer Part Number: 691778110014; Product Series: WR-TBL; ComponentLink1Description: Website Link; ComponentLink1URL: https://www.we-online.com; ComponentLink2Description: Datasheet Link; ComponentLink2URL: https://www.we-online.com/components/products/datasheet/691778110014; Mount: Through Hole Reflow; Operating Temperature Min: -40degC; Operating Temperature Max: 130degC; Packaging: Tape and Reel; Application: Pluggable; Number of Pins: 14; Number of Rows: 2; Orientation: Horizontal; Lead Pitch: 3.5mm
footprint 691778110014
pins: 1, 2, 3, 4, 5, 6, 7, 8, 9, 10, 11, 12, 13, 14

## 691778110016
designator P?  (value not drawn)
WR-TBL Series 7781 PCB Header Dual Row Horizontal, THR, pitch 3.5mm, 16p; Manufacturer: Wurth Elektronik; Insulator Material: LCP; Rated Current: 8A; Working Voltage: 150V (AC); Withstanding Voltage: 1300V (AC); Manufacturer Part Number: 691778110016; Product Series: WR-TBL; ComponentLink1Description: Website Link; ComponentLink1URL: https://www.we-online.com; ComponentLink2Description: Datasheet Link; ComponentLink2URL: https://www.we-online.com/components/products/datasheet/691778110016; Mount: Through Hole Reflow; Operating Temperature Min: -40degC; Operating Temperature Max: 130degC; Packaging: Tape and Reel; Application: Pluggable; Number of Pins: 16; Number of Rows: 2; Orientation: Horizontal; Lead Pitch: 3.5mm
footprint 691778110016
pins: 1, 2, 3, 4, 5, 6, 7, 8, 9, 10, 11, 12, 13, 14, 15, 16

## 691778110018
designator P?  (value not drawn)
WR-TBL Series 7781 PCB Header Dual Row Horizontal, THR, pitch 3.5mm, 18p; Manufacturer: Wurth Elektronik; Insulator Material: LCP; Rated Current: 8A; Working Voltage: 150V (AC); Withstanding Voltage: 1300V (AC); Manufacturer Part Number: 691778110018; Product Series: WR-TBL; ComponentLink1Description: Website Link; ComponentLink1URL: https://www.we-online.com; ComponentLink2Description: Datasheet Link; ComponentLink2URL: https://www.we-online.com/components/products/datasheet/691778110018; Mount: Through Hole Reflow; Operating Temperature Min: -40degC; Operating Temperature Max: 130degC; Packaging: Tape and Reel; Application: Pluggable; Number of Pins: 18; Number of Rows: 2; Orientation: Horizontal; Lead Pitch: 3.5mm
footprint 691778110018
pins: 1, 2, 3, 4, 5, 6, 7, 8, 9, 10, 11, 12, 13, 14, 15, 16, 17, 18

## 691778110020
designator P?  (value not drawn)
WR-TBL Series 7781 PCB Header Dual Row Horizontal, THR, pitch 3.5mm, 20p; Manufacturer: Wurth Elektronik; Insulator Material: LCP; Rated Current: 8A; Working Voltage: 150V (AC); Withstanding Voltage: 1300V (AC); Manufacturer Part Number: 691778110020; Product Series: WR-TBL; ComponentLink1Description: Website Link; ComponentLink1URL: https://www.we-online.com; ComponentLink2Description: Datasheet Link; ComponentLink2URL: https://www.we-online.com/components/products/datasheet/691778110020; Mount: Through Hole Reflow; Operating Temperature Min: -40degC; Operating Temperature Max: 130degC; Packaging: Tape and Reel; Application: Pluggable; Number of Pins: 20; Number of Rows: 2; Orientation: Horizontal; Lead Pitch: 3.5mm
footprint 691778110020
pins: 1, 2, 3, 4, 5, 6, 7, 8, 9, 10, 11, 12, 13, 14, 15, 16, 17, 18, 19, 20

## 691778110024
designator P?  (value not drawn)
WR-TBL Series 7781 PCB Header Dual Row Horizontal, THR, pitch 3.5mm, 24p; Manufacturer: Wurth Elektronik; Insulator Material: LCP; Rated Current: 8A; Working Voltage: 150V (AC); Withstanding Voltage: 1300V (AC); Manufacturer Part Number: 691778110024; Product Series: WR-TBL; ComponentLink1Description: Website Link; ComponentLink1URL: https://www.we-online.com; ComponentLink2Description: Datasheet Link; ComponentLink2URL: https://www.we-online.com/components/products/datasheet/691778110024; Mount: Through Hole Reflow; Operating Temperature Min: -40degC; Operating Temperature Max: 130degC; Packaging: Tape and Reel; Application: Pluggable; Number of Pins: 24; Number of Rows: 2; Orientation: Horizontal; Lead Pitch: 3.5mm
footprint 691778110024
pins: 1, 2, 3, 4, 5, 6, 7, 8, 9, 10, 11, 12, 13, 14, 15, 16, 17, 18, 19, 20, 21, 22, 23, 24

## 691778130004
designator P?  (value not drawn)
WR-TBL Series 7781 PCB Header Dual Row Vertical with flanges, THR, pitch 3.5mm, 04p; Manufacturer: Wurth Elektronik; Insulator Material: LCP; Rated Current: 8A; Working Voltage: 300V (AC); Withstanding Voltage: 1600V (AC); Manufacturer Part Number: 691778130004; Product Series: WR-TBL; ComponentLink1Description: Website Link; ComponentLink1URL: https://www.we-online.com; ComponentLink2Description: Datasheet Link; ComponentLink2URL: https://www.we-online.com/components/products/datasheet/691778130004; Mount: Through Hole Reflow; Operating Temperature Min: -40degC; Operating Temperature Max: 130degC; Packaging: Tape and Reel; Application: Pluggable; Number of Pins: 4; Number of Rows: 2; Orientation: Vertical; Lead Pitch: 3.5mm
footprint 691778130004
pins: 1, 2, 3, 4

## 691778130006
designator P?  (value not drawn)
WR-TBL Series 7781 PCB Header Dual Row Vertical with flanges, THR, pitch 3.5mm, 06p; Manufacturer: Wurth Elektronik; Insulator Material: LCP; Rated Current: 8A; Working Voltage: 300V (AC); Withstanding Voltage: 1600V (AC); Manufacturer Part Number: 691778130006; Product Series: WR-TBL; ComponentLink1Description: Website Link; ComponentLink1URL: https://www.we-online.com; ComponentLink2Description: Datasheet Link; ComponentLink2URL: https://www.we-online.com/components/products/datasheet/691778130006; Mount: Through Hole Reflow; Operating Temperature Min: -40degC; Operating Temperature Max: 130degC; Packaging: Tape and Reel; Application: Pluggable; Number of Pins: 6; Number of Rows: 2; Orientation: Vertical; Lead Pitch: 3.5mm
footprint 691778130006
pins: 1, 2, 3, 4, 5, 6

## 691778130008
designator P?  (value not drawn)
WR-TBL Series 7781 PCB Header Dual Row Vertical with flanges, THR, pitch 3.5mm, 08p; Manufacturer: Wurth Elektronik; Insulator Material: LCP; Rated Current: 8A; Working Voltage: 300V (AC); Withstanding Voltage: 1600V (AC); Manufacturer Part Number: 691778130008; Product Series: WR-TBL; ComponentLink1Description: Website Link; ComponentLink1URL: https://www.we-online.com; ComponentLink2Description: Datasheet Link; ComponentLink2URL: https://www.we-online.com/components/products/datasheet/691778130008; Mount: Through Hole Reflow; Operating Temperature Min: -40degC; Operating Temperature Max: 130degC; Packaging: Tape and Reel; Application: Pluggable; Number of Pins: 8; Number of Rows: 2; Orientation: Vertical; Lead Pitch: 3.5mm
footprint 691778130008
pins: 1, 2, 3, 4, 5, 6, 7, 8

## 691778130010
designator P?  (value not drawn)
WR-TBL Series 7781 PCB Header Dual Row Vertical with flanges, THR, pitch 3.5mm, 10p; Manufacturer: Wurth Elektronik; Insulator Material: LCP; Rated Current: 8A; Working Voltage: 300V (AC); Withstanding Voltage: 1600V (AC); Manufacturer Part Number: 691778130010; Product Series: WR-TBL; ComponentLink1Description: Website Link; ComponentLink1URL: https://www.we-online.com; ComponentLink2Description: Datasheet Link; ComponentLink2URL: https://www.we-online.com/components/products/datasheet/691778130010; Mount: Through Hole Reflow; Operating Temperature Min: -40degC; Operating Temperature Max: 130degC; Packaging: Tape and Reel; Application: Pluggable; Number of Pins: 10; Number of Rows: 2; Orientation: Vertical; Lead Pitch: 3.5mm
footprint 691778130010
pins: 1, 2, 3, 4, 5, 6, 7, 8, 9, 10

## 691778130012
designator P?  (value not drawn)
WR-TBL Series 7781 PCB Header Dual Row Vertical with flanges, THR, pitch 3.5mm, 12p; Manufacturer: Wurth Elektronik; Insulator Material: LCP; Rated Current: 8A; Working Voltage: 300V (AC); Withstanding Voltage: 1600V (AC); Manufacturer Part Number: 691778130012; Product Series: WR-TBL; ComponentLink1Description: Website Link; ComponentLink1URL: https://www.we-online.com; ComponentLink2Description: Datasheet Link; ComponentLink2URL: https://www.we-online.com/components/products/datasheet/691778130012; Mount: Through Hole Reflow; Operating Temperature Min: -40degC; Operating Temperature Max: 130degC; Packaging: Tape and Reel; Application: Pluggable; Number of Pins: 12; Number of Rows: 2; Orientation: Vertical; Lead Pitch: 3.5mm
footprint 691778130012
pins: 1, 2, 3, 4, 5, 6, 7, 8, 9, 10, 11, 12

## 691778130014
designator P?  (value not drawn)
WR-TBL Series 7781 PCB Header Dual Row Vertical with flanges, THR, pitch 3.5mm, 14p; Manufacturer: Wurth Elektronik; Insulator Material: LCP; Rated Current: 8A; Working Voltage: 300V (AC); Withstanding Voltage: 1600V (AC); Manufacturer Part Number: 691778130014; Product Series: WR-TBL; ComponentLink1Description: Website Link; ComponentLink1URL: https://www.we-online.com; ComponentLink2Description: Datasheet Link; ComponentLink2URL: https://www.we-online.com/components/products/datasheet/691778130014; Mount: Through Hole Reflow; Operating Temperature Min: -40degC; Operating Temperature Max: 130degC; Packaging: Tape and Reel; Application: Pluggable; Number of Pins: 14; Number of Rows: 2; Orientation: Vertical; Lead Pitch: 3.5mm
footprint 691778130014
pins: 1, 2, 3, 4, 5, 6, 7, 8, 9, 10, 11, 12, 13, 14

## 691778130016
designator P?  (value not drawn)
WR-TBL Series 7781 PCB Header Dual Row Vertical with flanges, THR, pitch 3.5mm, 16p; Manufacturer: Wurth Elektronik; Insulator Material: LCP; Rated Current: 8A; Working Voltage: 300V (AC); Withstanding Voltage: 1600V (AC); Manufacturer Part Number: 691778130016; Product Series: WR-TBL; ComponentLink1Description: Website Link; ComponentLink1URL: https://www.we-online.com; ComponentLink2Description: Datasheet Link; ComponentLink2URL: https://www.we-online.com/components/products/datasheet/691778130016; Mount: Through Hole Reflow; Operating Temperature Min: -40degC; Operating Temperature Max: 130degC; Packaging: Tape and Reel; Application: Pluggable; Number of Pins: 16; Number of Rows: 2; Orientation: Vertical; Lead Pitch: 3.5mm
footprint 691778130016
pins: 1, 2, 3, 4, 5, 6, 7, 8, 9, 10, 11, 12, 13, 14, 15, 16

## 691778130018
designator P?  (value not drawn)
WR-TBL Series 7781 PCB Header Dual Row Vertical with flanges, THR, pitch 3.5mm, 18p; Manufacturer: Wurth Elektronik; Insulator Material: LCP; Rated Current: 8A; Working Voltage: 300V (AC); Withstanding Voltage: 1600V (AC); Manufacturer Part Number: 691778130018; Product Series: WR-TBL; ComponentLink1Description: Website Link; ComponentLink1URL: https://www.we-online.com; ComponentLink2Description: Datasheet Link; ComponentLink2URL: https://www.we-online.com/components/products/datasheet/691778130018; Mount: Through Hole Reflow; Operating Temperature Min: -40degC; Operating Temperature Max: 130degC; Packaging: Tape and Reel; Application: Pluggable; Number of Pins: 18; Number of Rows: 2; Orientation: Vertical; Lead Pitch: 3.5mm
footprint 691778130018
pins: 1, 2, 3, 4, 5, 6, 7, 8, 9, 10, 11, 12, 13, 14, 15, 16, 17, 18

## 691778130020
designator P?  (value not drawn)
WR-TBL Series 7781 PCB Header Dual Row Vertical with flanges, THR, pitch 3.5mm, 20p; Manufacturer: Wurth Elektronik; Insulator Material: LCP; Rated Current: 8A; Working Voltage: 300V (AC); Withstanding Voltage: 1600V (AC); Manufacturer Part Number: 691778130020; Product Series: WR-TBL; ComponentLink1Description: Website Link; ComponentLink1URL: https://www.we-online.com; ComponentLink2Description: Datasheet Link; ComponentLink2URL: https://www.we-online.com/components/products/datasheet/691778130020; Mount: Through Hole Reflow; Operating Temperature Min: -40degC; Operating Temperature Max: 130degC; Packaging: Tape and Reel; Application: Pluggable; Number of Pins: 20; Number of Rows: 2; Orientation: Vertical; Lead Pitch: 3.5mm
footprint 691778130020
pins: 1, 2, 3, 4, 5, 6, 7, 8, 9, 10, 11, 12, 13, 14, 15, 16, 17, 18, 19, 20